# Altium schematic symbol library Diode%.SchLib: 376 symbols (part 9 of 9)
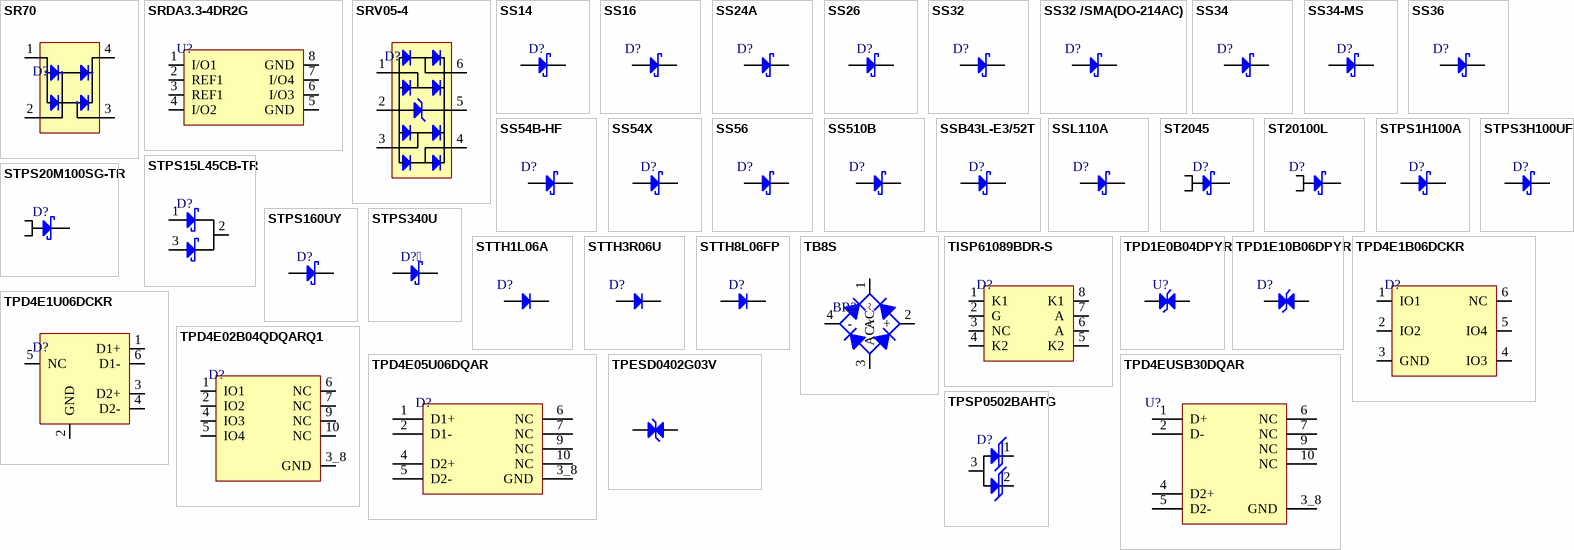
[diagram p17: symbols SR70 to TPSP0502BAHTG]

## STTH1L06A
designator D?
Diode Standard 600V 1A Surface Mount SMA; Manufacturer: STMicroelectronics; Manufacturer Part Number: STTH1L06A; Max Reverse Current: 1uA; Reverse Recovery Time: 80ns; Peak Non-Repetitive Surge Current: 20A; Forward Voltage: 1.3V; Max Forward Surge Current (Ifsm): 10A; Supplier: Mouser; Supplier Part Number: 511-STTH1L06A; RoHS: Yes; Category: Rectifier Diodes; Stock: 400; Pricing: 1=0.44, 10=0.377, 50=0.377, 100=0.283, 1000=0.163, 10000=0.138 (USD); Mounting Technology: Surface Mount; Case/Package: SMA; Pins: 2; Min Operating Temperature: -65°C; Max Operating Temperature: 175°C; Forward Current: 1A; Max Repetitive Reverse Voltage (Vrrm): 600V; Package Quantity: 1; Packaging: Tape and Reel; Max Surge Current: 20A; Recovery Time: 80ns; Average Rectified Current: 1A; Polarity: Standard; Voltage Rating (DC): 600V; Output Current: 1A; Current Rating: 1A; Max Reverse Voltage (DC): 600V; Reverse Voltage: 600V; Series: -; Reverse Recovery Time-Max: 80ns; Length: 4.6mm; Width: 2.95mm; Height: 2.03mm; Radiation Hardening: No; Reach SVHC Compliant: No; Lead Free: Lead Free; RoHS Compliant: Yes; ComponentLink1URL: https://datasheet.ciiva.com/915/cd00002694-915859.pdf?src-supplier=Digi-Key; ComponentLink1Description: https://datasheet.ciiva.com/915/cd00002694-915859.pdf?src-supplier=Digi-Key; ComponentLink2URL: https://datasheet.ciiva.com/915/cd00002694-915858.pdf?src-supplier=Digi-Key; ComponentLink2Description: https://datasheet.ciiva.com/915/cd00002694-915858.pdf?src-supplier=Digi-Key; ComponentLink3URL: https://datasheet.ciiva.com/915/cd00002694-915860.pdf?src-supplier=Digi-Key; ComponentLink3Description: https://datasheet.ciiva.com/915/cd00002694-915860.pdf?src-supplier=Digi-Key; ComponentLink4URL: https://datasheet.ciiva.com/7964/1671053-7964013.pdf?src-supplier=Element14; ComponentLink4Description: https://datasheet.ciiva.com/7964/1671053-7964013.pdf?src-supplier=Element14; ComponentLink5URL: https://datasheet.ciiva.com/7964/1671053-7964014.pdf?src-supplier=Element14; ComponentLink5Description: https://datasheet.ciiva.com/7964/1671053-7964014.pdf?src-supplier=Element14; ComponentLink6URL: https://datasheet.ciiva.com/26818/getdatasheetpartid-65243-26818021.pdf?src-supplier=Verical; ComponentLink6Description: https://datasheet.ciiva.com/26818/getdatasheetpartid-65243-26818021.pdf?src-supplier=Verical; LCSC Part Number: C98801; Item Type: Diode
footprint SMA
pins: 1 K, 2 A

## STTH3R06U
designator D?
DIODE GEN PURP 600V 3A SMB; Manufacturer: STMicroelectronics; Manufacturer Part Number: STTH3R06U; Supplier: Mouser; Supplier Part Number: 511-STTH3R06U; RoHS: Yes; Category: Rectifier Diodes; Stock: 11406; Pricing: 1=0.87, 10=0.782, 50=0.782, 100=0.61, 1000=0.392, 10000=0.339 (USD); ComponentLink1URL: https://datasheet.ciiva.com/4452/cd00005137-58102-4452784.pdf?src-supplier=Mouser; ComponentLink1Description: https://datasheet.ciiva.com/4452/cd00005137-58102-4452784.pdf?src-supplier=Mouser; ComponentLink2URL: https://datasheet.ciiva.com/22735/1671131-22735253.pdf?src-supplier=Element14; ComponentLink2Description: https://datasheet.ciiva.com/22735/1671131-22735253.pdf?src-supplier=Element14; ComponentLink3URL: https://datasheet.ciiva.com/16491/cd00005137-16491959.pdf?src-supplier=Future+Electronics; ComponentLink3Description: https://datasheet.ciiva.com/16491/cd00005137-16491959.pdf?src-supplier=Future+Electronics; ComponentLink4URL: https://datasheet.ciiva.com/916/cd00005137-916206.pdf?src-supplier=Digikey; ComponentLink4Description: https://datasheet.ciiva.com/916/cd00005137-916206.pdf?src-supplier=Digikey; ComponentLink5URL: https://datasheet.ciiva.com/916/cd00005137-916207.pdf?src-supplier=Digikey; ComponentLink5Description: https://datasheet.ciiva.com/916/cd00005137-916207.pdf?src-supplier=Digikey; ComponentLink6URL: https://datasheet.ciiva.com/916/cd00005137-916208.pdf?src-supplier=Digikey; ComponentLink6Description: https://datasheet.ciiva.com/916/cd00005137-916208.pdf?src-supplier=Digikey; LCSC Part Number: C84189; Item Type: Diode
footprint SMB_
pins: 1 A, 2 K

## STTH8L06FP
designator D?
DIODE GEN PURP 600V 8A TO220FPAC; Manufacturer: STMicroelectronics; Manufacturer Part Number: STTH8L06FP; Supplier: Mouser; LCSC Part Number: C77956; RoHS: Yes; Item Type: Diode; Stock: 2675; Pricing: 1=0.8, 10=0.793, 50=0.793, 100=0.793, 1000=0.673, 10000=0.377 (USD); ComponentLink1URL: https://datasheet.ciiva.com/4455/cd00002721-110256-4455363.pdf?src-supplier=Mouser; ComponentLink1Description: https://datasheet.ciiva.com/4455/cd00002721-110256-4455363.pdf?src-supplier=Mouser; ComponentLink2URL: https://datasheet.ciiva.com/7964/1522573-7964086.pdf?src-supplier=Element14; ComponentLink2Description: https://datasheet.ciiva.com/7964/1522573-7964086.pdf?src-supplier=Element14; ComponentLink3URL: https://datasheet.ciiva.com/917/cd00002721-917751.pdf?src-supplier=Digikey; ComponentLink3Description: https://datasheet.ciiva.com/917/cd00002721-917751.pdf?src-supplier=Digikey; ComponentLink4URL: https://datasheet.ciiva.com/14169/cd00002721-14169005.pdf?src-supplier=Distrelec; ComponentLink4Description: https://datasheet.ciiva.com/14169/cd00002721-14169005.pdf?src-supplier=Distrelec
footprint TO-220-2
pins: 1 K, 2 A

## TB8S
designator BR?
30A 950mV@1A 1A 800V TBS Bridge Rectifiers ROHS; Manufacturer: MDD; Manufacturer Part Number: TB8S; Package: TBS; LCSC Part Number: C65030; Item Type: Bridge Rectifier; ComponentLink1Description: LCSC; ComponentLink1URL: https://www.lcsc.com/product-detail/Bridge-Rectifiers_MDD-Microdiode-Electronics-TB8S_C65030.html
footprint TB8S
pins: 1 AC~, 2 +, 3 AC~, 4 -

## TISP61089BDR-S
designator D?
THYRISTOR 170V 30A 8SOIC; Manufacturer: Bourns; Manufacturer Part Number: TISP61089BDR-S; Number of Elements: 2; Value: 100pF; Forward Voltage: 3V; Hold Current: 150mA; Current Rating: -5uA; Item Type: (TVS/ESD); Supplier: Digikey; Supplier Part Number: TISP61089BDR-SCT-ND; RoHS: Yes; Category: TRIACs; Stock: 22616; Pricing: 1=1.38, 10=1.129, 100=0.8781, 500=0.74428, 1000=0.6063 (USD); Mounting Technology: Surface Mount; Case/Package: SOIC; Pins: 8; Weight: 0.004762oz; Min Operating Temperature: -40°C; Max Operating Temperature: 85°C; Packaging: Tape and Reel; Package Quantity: 2500; Max Repetitive Reverse Voltage (Vrrm): 170V; Number of Circuits: 2; Peak Pulse Current: 30A; Operating Supply Voltage: 3V; Series: -; Length: 5mm; Width: 4mm; Height: 1.55mm; Radiation Hardening: No; Reach SVHC Compliant: No; Lead Free: Lead Free; RoHS Compliant: Yes; ComponentLink1URL: https://datasheet.ciiva.com/30076/tisp61089b-30076825.pdf?src-supplier=Onlinecomponents.com; ComponentLink1Description: https://datasheet.ciiva.com/30076/tisp61089b-30076825.pdf?src-supplier=Onlinecomponents.com; ComponentLink2URL: https://datasheet.ciiva.com/46364/2035135-46364842.pdf?src-supplier=Jameco; ComponentLink2Description: https://datasheet.ciiva.com/46364/2035135-46364842.pdf?src-supplier=Jameco; ComponentLink3URL: https://datasheet.ciiva.com/4744/tisp61089b-75813-4744776.pdf?src-supplier=Mouser; ComponentLink3Description: https://datasheet.ciiva.com/4744/tisp61089b-75813-4744776.pdf?src-supplier=Mouser; ComponentLink4URL: https://datasheet.ciiva.com/362/tisp61089b-362311.pdf?src-supplier=Digikey; ComponentLink4Description: https://datasheet.ciiva.com/362/tisp61089b-362311.pdf?src-supplier=Digikey; LCSC Part Number: C415877
footprint SOIC-8(0.154", 3.90mm Width)
pins: 1 K1, 2 G, 3 NC, 4 K2, 5 K2, 6 A, 7 A, 8 K1

## TPD1E0B04DPYR
designator U?
TVS DIODE 3.6VWM 19VC 2X1SON; Manufacturer: Texas Instruments; Manufacturer Part Number: TPD1E0B04DPYR; Interface: USB; Number of Channels: 1; Reverse Standoff Voltage: 3.6V; Min Breakdown Voltage: 6.7V; Peak Pulse Current: 1.7A; Peak Pulse Power: 15W; Power Line Protection: No; Diode Type: ZENER; Direction: 211Direction; Supplier: Digikey; Supplier Part Number: 296-47864-1-ND; RoHS: Yes; Category: Integrated Circuits (ICs); Stock: 16132; Pricing: 1=0.32, 10=0.216, 100=0.095, 500=0.09, 1000=0.08874 (USD); Mounting Technology: Surface Mount; Case/Package: 0402; Pins: 2NUMBER; Case Code (Imperial): 0402; Case Code (Metric): 1006; Min Operating Temperature: -40°C; Max Operating Temperature: 125°C; Packaging: Cut Tape; Number of Bidirectional Channels: 1; Series: -; Breakdown Voltage: 6.7V; Length: 600um; Width: 1mm; Height: 450um; Thickness: 370um; RoHS Compliant: Yes; ComponentLink1URL: http://www.ti.com/lit/ds/symlink/tpd1e0b04.pdf?src-supplier=Digikey; ComponentLink1Description: http://www.ti.com/lit/ds/symlink/tpd1e0b04.pdf?src-supplier=Digikey; ComponentLink2URL: http://www.ti.com/general/docs/suppproductinfo.tsp?distId=10&amp;gotoUrl=http%3A%2F%2Fwww.ti.com%2Flit%2Fgpn%2Ftpd1e0b04&src-supplier=Digikey; ComponentLink2Description: http://www.ti.com/general/docs/suppproductinfo.tsp?distId=10&amp;gotoUrl=http%3A%2F%2Fwww.ti.com%2Flit%2Fgpn%2Ftpd1e0b04&src-supplier=Digikey
footprint 2-X1SON (1x.60)
pins: 1 K, 2 A

## TPD1E10B06DPYR
designator D?
DIODE TVS SMD 5.5V 5A 90W; Manufacturer: Texas Instruments; Manufacturer Part Number: TPD1E10B06DPYR; Capacitance: 12pF; Direction: Bidirectional; Breakdown Voltage: 6V; Number of Channels: 1; Clamping Voltage: 14V; Power Line Protection: No; Leakage Current: 100nA; ESD Protection: Yes; Test Current: 1mA; Element Configuration: Single; Interface: GPIO; Diode Type: ZENER; Supplier 1: Mouser; RoHS: Yes; Category: TVS Diodes; Pricing 1: 1=0.39000, 10=0.29800, 50=0.29800, 100=0.18600, 500=0.12700, 1000=0.09800, 2500=0.08300, 10000=0.07500 (USD); Case/Package: SON; Number of Pins: 2; Contact Plating: Gold; Min Operating Temperature: -40°C; Max Operating Temperature: 125°C; Package Quantity: 1; Packaging: Tape and Reel; Number of Bidirectional Channels: 1; Reverse Standoff Voltage: 5.5V; Min Breakdown Voltage: 6V; Peak Pulse Power: 90W; Working Voltage: 5.5V; Max Reverse Leakage Current: 100nA; Peak Pulse Current: 5A; Resistor Type: Zener; Series: -; Length: 1.1mm; Width: 0.7mm; Height: 0.35mm; Radiation Hardening: No; REACH SVHC: No SVHC; Lead Free: Lead Free; RoHS Compliant: Yes; ComponentLink1URL: https://datasheet.ciiva.com/22691/1877100-22691786.pdf?src-supplier=Element14; ComponentLink1Description: https://datasheet.ciiva.com/22691/1877100-22691786.pdf?src-supplier=Element14; ComponentLink2URL: https://datasheet.ciiva.com/46384/1877100-46384054.pdf?src-supplier=Element14; ComponentLink2Description: https://datasheet.ciiva.com/46384/1877100-46384054.pdf?src-supplier=Element14; ComponentLink3URL: https://datasheet.ciiva.com/2961/tpd1e10b06-2961245.pdf?src-supplier=Digi-Key; ComponentLink3Description: https://datasheet.ciiva.com/2961/tpd1e10b06-2961245.pdf?src-supplier=Digi-Key; ComponentLink4URL: https://datasheet.ciiva.com/6574/tpd1e10b06-6574654.pdf?src-supplier=Digi-Key; ComponentLink4Description: https://datasheet.ciiva.com/6574/tpd1e10b06-6574654.pdf?src-supplier=Digi-Key; ComponentLink5URL: https://datasheet.ciiva.com/2961/tpd1e10b06-2961246.pdf?src-supplier=Digi-Key; ComponentLink5Description: https://datasheet.ciiva.com/2961/tpd1e10b06-2961246.pdf?src-supplier=Digi-Key; ComponentLink6URL: https://datasheet.ciiva.com/14195/tpd1e10b06-14195178.pdf?src-supplier=Avnet; ComponentLink6Description: https://datasheet.ciiva.com/14195/tpd1e10b06-14195178.pdf?src-supplier=Avnet; Supplier Part Number 1: 595-TPD1E10B06DPYR
footprint X1SON (TVS 6A@80/20µs 14V 6V 5.5V@(MAX))
pins: 1 K, 2 A

## TPD4E1B06DCKR
designator D?
TVS DIODE 5.5VWM 14.5VC SC706; Manufacturer: Texas Instruments; Manufacturer Part Number: TPD4E1B06DCKR; Item Type: IC; Supplier: Mouser; LCSC Part Number: C840093; RoHS: Yes; Stock: 26732; Pricing: 1=0.62, 10=0.453, 50=0.453, 100=0.31, 1000=0.236, 10000=0.195 (USD); ComponentLink1URL: https://datasheet.ciiva.com/6574/tpd4e1b06-6574671.pdf?src-supplier=Digikey; ComponentLink1Description: https://datasheet.ciiva.com/6574/tpd4e1b06-6574671.pdf?src-supplier=Digikey; ComponentLink2URL: https://datasheet.ciiva.com/12545/tpd4e1b06-224687-12545147.pdf?src-supplier=Mouser; ComponentLink2Description: https://datasheet.ciiva.com/12545/tpd4e1b06-224687-12545147.pdf?src-supplier=Mouser
footprint SOT-363
pins: 1 IO1, 2 IO2, 3 GND, 4 IO3, 5 IO4, 6 NC

## TPD4E1U06DCKR
designator D?
TVS DIODE 5.5VWM 15VC SC70-6; Manufacturer: Texas Instruments; Manufacturer Part Number: TPD4E1U06DCKR; Direction: Unidirectional; Value: 1pF; Operating Supply Voltage: 5.5V; Min Breakdown Voltage: 6.5V; Clamping Voltage: 11V; Peak Pulse Power: 45W; Power Line Protection: Yes; Number of Channels: 4; Test Current: 1mA; Max Reverse Leakage Current: 10nA; Peak Pulse Current: 3A; Interface: LVDS,USB,Ethernet; Supplier: Mouser; LCSC Part Number: C194628; RoHS: Yes; Item Type: TVS; Stock: 17577; Pricing: 1=0.35, 10=0.268, 50=0.268, 100=0.163, 1000=0.102, 10000=0.081 (USD); Mounting Technology: Surface Mount; Case/Package: SC; Pins: 6; Min Operating Temperature: -40°C; Max Operating Temperature: 125°C; Package Quantity: 3000; Packaging: Tape and Reel; Reverse Standoff Voltage: 5.5V; Breakdown Voltage: 6.5V; Termination: SMD/SMT; ESD Protection: Yes; Working Voltage: 5.5V; Max Power Dissipation: 45W; Series: -; Number of Unidirectional Channels: 4; Length: 2.15mm; Width: 1.4mm; Height: 1mm; Reach SVHC Compliant: No; Lead Free: Lead Free; RoHS Compliant: Yes; ComponentLink1URL: https://datasheet.ciiva.com/12545/tpd4e1u06-224689-12545136.pdf?src-supplier=Mouser; ComponentLink1Description: https://datasheet.ciiva.com/12545/tpd4e1u06-224689-12545136.pdf?src-supplier=Mouser
footprint SOT-363
pins: 1 D1+, 2 GND, 3 D2+, 4 D2-, 5 NC, 6 D1-

## TPD4E02B04QDQARQ1
designator D?
TVS DIODE 3.6VWM 8.8VC 10USON; Manufacturer: Texas Instruments; Manufacturer Part Number: TPD4E02B04QDQARQ1; Interface: LVDS,USB,Ethernet,HDMI; Number of Channels: 4; Reverse Standoff Voltage: 3.6V; Min Breakdown Voltage: 5.5V; Peak Pulse Current: 2A; Peak Pulse Power: 17W; Power Line Protection: No; Diode Type: ZENER; Supplier: Mouser; Supplier Part Number: 595-D4E02B04QDQARQ1; RoHS: Yes; Category: Integrated Circuits (ICs); Stock: 28501; Pricing: 1=0.68, 10=0.579, 50=0.579, 100=0.403, 1000=0.286, 10000=0.227 (USD); Mounting Technology: Surface Mount; Pins: 10; Min Operating Temperature: -40°C; Max Operating Temperature: 125°C; Packaging: Cut Tape; Number of Bidirectional Channels: 4; Series: Automotive, AEC-Q101; RoHS Compliant: Yes; ComponentLink1URL: http://www.ti.com/lit/ds/symlink/tpd4e02b04-q1.pdf?src-supplier=Digikey; ComponentLink1Description: http://www.ti.com/lit/ds/symlink/tpd4e02b04-q1.pdf?src-supplier=Digikey; LCSC Part Number: C1973193; Item Type: Diode
footprint uSON_10
pins: 1 IO1, 2 IO2, 3_8 GND, 4 IO3, 5 IO4, 6 NC, 7 NC, 9 NC, 10 NC

## TPD4E05U06DQAR
designator D?
uSON-10 ESD Protection Devices ROHS; Manufacturer: TECH PUBLIC; Manufacturer Part Number: TPD4E05U06DQAR; Item Type: Diode; ComponentLink1Description: LCSC; ComponentLink1URL: https://lcsc.com/product-detail/ESD-Protection-Devices_TECH-PUBLIC-TPD4E05U06DQAR_C2827646.html; Footprint: uSON-10; LCSC Part Number: C2827646
footprint uSON_10
pins: 1 D1+, 2 D1-, 3_8 GND, 4 D2+, 5 D2-, 6 NC, 7 NC, 9 NC, 10 NC

## TPD4EUSB30DQAR
designator U?
TVS DIODE 5.5V 8V 10USON; Manufacturer: Texas Instruments; Manufacturer Part Number: TPD4EUSB30DQAR; Direction: Unidirectional; Capacitance: 0.8pF; Number of Bidirectional Channels: 4; Peak Pulse Power: 45W; Power Line Protection: Yes; Breakdown Voltage: 7V; Peak Pulse Current: 1A; Interface: USB; Data Rate: 6Gbps; Current Rating: 5A; ComponentLink1URL: http://sg.element14.com/webapp/wcs/stores/servlet/OpenCAD?catalogId=15001&langId=65&id=800000154998&storeId=10191&returnURL=http%3A%2F%2Fsg.element14.com%2Ftexas-instruments%2Ftpd2eusb30adrtr%2Fdiode-esd-dual-usb3-0-sot-3%2Fdp%2F1869645&src-supplier=Element14; ComponentLink1Description: http://sg.element14.com/webapp/wcs/stores/servlet/OpenCAD?catalogId=15001&langId=65&id=800000154998&storeId=10191&returnURL=http%3A%2F%2Fsg.element14.com%2Ftexas-instruments%2Ftpd2eusb30adrtr%2Fdiode-esd-dual-usb3-0-sot-3%2Fdp%2F1869645&src-supplier=Element14; ComponentLink2URL: http://www.ti.com/general/docs/lit/getliterature.tsp?genericPartNumber=TPD2EUSB30A&&fileType=pdf&src-supplier=Element14; ComponentLink2Description: http://www.ti.com/general/docs/lit/getliterature.tsp?genericPartNumber=TPD2EUSB30A&&fileType=pdf&src-supplier=Element14; ComponentLink3URL: http://www.ti.com/lit/ds/symlink/tpd2eusb30a.pdf?src-supplier=Digi-Key; ComponentLink3Description: http://www.ti.com/lit/ds/symlink/tpd2eusb30a.pdf?src-supplier=Digi-Key; ComponentLink4URL: https://www.verical.com/server-webapp/html/getDatasheet?partID=318065&src-supplier=Verical; ComponentLink4Description: https://www.verical.com/server-webapp/html/getDatasheet?partID=318065&src-supplier=Verical; ComponentLink5URL: http://focus.ti.com/lit/ds/symlink/tpd4eusb30.pdf?src-supplier=Avnet+Europe; ComponentLink5Description: http://focus.ti.com/lit/ds/symlink/tpd4eusb30.pdf?src-supplier=Avnet+Europe; Supplier 1: Digi-Key; Stock 1: 1718; Pricing 1: 1=0.83, 10=0.735, 100=0.5632, 500=0.4452, 1000=0.35616 (USD); Number of Pins: 10; Min Operating Temperature: -40°C; Max Operating Temperature: 85°C; Package Quantity: 1; Packaging: Tape and Reel; Reverse Standoff Voltage: 5.5V; Min Breakdown Voltage: 8V; Clamping Voltage: 8V; Number of Channels: 4; Working Voltage: 5.5V; ESD Protection: Yes; Termination: SMD/SMT; Length: 2.5mm; Width: 1.1mm; Height: 0.5mm; Depth: 1mm; Radiation Hardening: No; REACH SVHC: No SVHC; Lead Free: Lead Free; RoHS Compliant: Yes; ComponentLink6URL: http://www.ti.com/general/docs/lit/getliterature.tsp?genericPartNumber=TPD4EUSB30&&fileType=pdf&src-supplier=Farnell; ComponentLink6Description: http://www.ti.com/general/docs/lit/getliterature.tsp?genericPartNumber=TPD4EUSB30&&fileType=pdf&src-supplier=Farnell; ComponentLink7URL: http://www.farnell.com/datasheets/1882087.pdf?src-supplier=Element14; ComponentLink7Description: http://www.farnell.com/datasheets/1882087.pdf?src-supplier=Element14; ComponentLink8URL: http://www.farnell.com/datasheets/2003422.pdf?src-supplier=Element14; ComponentLink8Description: http://www.farnell.com/datasheets/2003422.pdf?src-supplier=Element14; ComponentLink9URL: http://www.ti.com/lit/ds/symlink/tpd4eusb30.pdf?src-supplier=Digi-Key; ComponentLink9Description: http://www.ti.com/lit/ds/symlink/tpd4eusb30.pdf?src-supplier=Digi-Key; ComponentLink10URL: https://www.verical.com/server-webapp/html/getDatasheet?partID=299321&src-supplier=Verical; ComponentLink10Description: https://www.verical.com/server-webapp/html/getDatasheet?partID=299321&src-supplier=Verical; Supplier Part Number 1: 296-28063-1-ND; LCSC Part Number: C90627
footprint uSON_10
pins: 1 D+, 2 D-, 3_8 GND, 4 D2+, 5 D2-, 6 NC, 7 NC, 9 NC, 10 NC

## TPESD0402G03V
designator D?
0402 ESD and Surge Protection (TVS/ESD) ROHS; Manufacturer: TECH PUBLIC; Manufacturer Part Number: TPESD0402G03V; Item Type: ESD Diode; Package: 0402; LCSC Part Number: C558614; ComponentLink1Description: LCSC; ComponentLink1URL: https://www.lcsc.com/product-detail/span-style-background-color-ff0-ESD-span-Protection-Devices_TECH-PUBLIC-TPESD0402G03V_C558614.html
footprint TPESD0402G03V
pins: 1 A, 2 A

## TPSP0502BAHTG
designator D?
SOT-23(TO-236) ESD Protection Devices ROHS; Manufacturer: TECH PUBLIC; Manufacturer Part Number: TPSP0502BAHTG; Package: SOT-23(TO-236); LCSC Part Number: C2827647; Item Type: ESD Protection; ComponentLink1Description: LCSC; ComponentLink1URL: https://www.lcsc.com/product-detail/ESD-Protection-Devices_TECH-PUBLIC-TPSP0502BAHTG_C2827647.html
footprint SOT-23 (TRANS NPN 40V 0.6A SOT23)
pins: 1 K, 2 K, 3 A

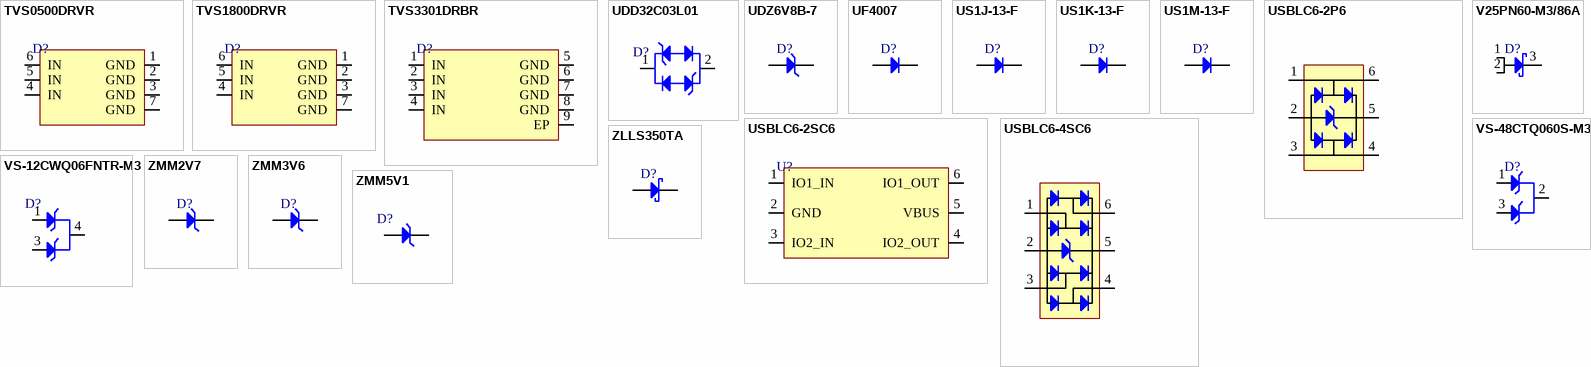
[diagram p9: symbols TVS0500DRVR to ZMM5V1]

## TVS0500DRVR
designator D?
9.5V 400W 7.5V 5V WSON-6(2x2) ESD and Surge Protection (TVS/ESD) ROHS; Manufacturer: Texas Instruments; Manufacturer Part Number: TVS0500DRVR; Item Type: TVS Diodes; Supplier: Digikey; LCSC Part Number: C609571; RoHS: Yes; Stock: 3745; Pricing: 1=0.51, 10=0.373, 100=0.254, 500=0.199, 1000=0.178 (USD); ComponentLink1URL: http://www.ti.com/lit/ds/symlink/tvs0500.pdf?src-supplier=Farnell; ComponentLink1Description: http://www.ti.com/lit/ds/symlink/tvs0500.pdf?src-supplier=Farnell; ComponentLink2URL: http://www.ti.com/lit/ds/symlink/tvs0500.pdf?src-supplier=Digikey; ComponentLink2Description: http://www.ti.com/lit/ds/symlink/tvs0500.pdf?src-supplier=Digikey
footprint WSON-6(2x2)
pins: 1 GND, 2 GND, 3 GND, 4 IN, 5 IN, 6 IN, 7 GND

## TVS1800DRVR
designator D?
1 Surface Mount WSON-6(2x2) Surge Protection Devices (SPDs) ROHS; Manufacturer: Texas Instruments; Manufacturer Part Number: TVS1800DRVR; Item Type: ESD Diode; Supplier: Mouser; LCSC Part Number: C2649846; RoHS: Yes; Stock: 5073; Pricing: 1=0.5, 10=0.388, 50=0.388, 100=0.294, 1000=0.227, 10000=0.185 (USD); Pins: 6NUMBER; Length: 2mm; Width: 2mm; Height: 800um; Thickness: 750um; ComponentLink1URL: http://www.ti.com/general/docs/suppproductinfo.tsp?distId=10&amp;gotoUrl=http%3A%2F%2Fwww.ti.com%2Flit%2Fgpn%2Ftvs1800&src-supplier=Digikey; ComponentLink1Description: http://www.ti.com/general/docs/suppproductinfo.tsp?distId=10&amp;gotoUrl=http%3A%2F%2Fwww.ti.com%2Flit%2Fgpn%2Ftvs1800&src-supplier=Digikey
footprint WSON-6(2x2)
pins: 1 GND, 2 GND, 3 GND, 4 IN, 5 IN, 6 IN, 7 GND

## TVS3301DRBR
designator D?
TVS DEVICE MIXED 42.5V 8SON; Manufacturer: Texas Instruments; Manufacturer Part Number: TVS3301DRBR; Item Type: IC; Supplier: Mouser; LCSC Part Number: C2864392; RoHS: Yes; Stock: 4054; Pricing: 1=0.59, 10=0.505, 50=0.505, 100=0.351, 1000=0.223, 10000=0.157 (USD); ComponentLink1URL: http://www.ti.com/lit/ds/symlink/tvs3301.pdf?src-supplier=Digikey; ComponentLink1Description: http://www.ti.com/lit/ds/symlink/tvs3301.pdf?src-supplier=Digikey
footprint 8-SON (3x3)
pins: 1 IN, 2 IN, 3 IN, 4 IN, 5 GND, 6 GND, 7 GND, 8 GND, 9 EP

## UDD32C03L01
designator D?
15V 19A 3.3V 4V Bidirectional SOD-323 ESD Protection Devices ROHS; Manufacturer: Brightking; Manufacturer Part Number: UDD32C03L01; Item Type: ESD Diode; Footprint: SOD-323; ComponentLink1Description: LCSC; ComponentLink1URL: https://lcsc.com/product-detail/span-style-background-color-ff0-ESD-span-Protection-Devices_Brightking-Elec-TAIWAN-UDD32C03L01_C78439.html; LCSC Part Number: C78439
footprint SOD-323
pins: 1, 2

## UDZ6V8B-7
designator D?
DIODE ZENER 6.79V 200MW SOD323; Manufacturer: Diodes; Manufacturer Part Number: UDZ6V8B-7; Item Type: Zener Diodes; Supplier: Avnet; LCSC Part Number: C444958; RoHS: Yes; Stock: 333000; Pricing: 3000=0.0198, 6000=0.01966, 12000=0.01935, 18000=0.01905, 24000=0.01882 (USD); ComponentLink1URL: http://www.mouser.com/ds/2/115/ds30290-90397.pdf?src-supplier=Mouser; ComponentLink1Description: http://www.mouser.com/ds/2/115/ds30290-90397.pdf?src-supplier=Mouser; ComponentLink2URL: https://www.diodes.com/assets/Datasheets/ds30290.pdf?src-supplier=Digikey; ComponentLink2Description: https://www.diodes.com/assets/Datasheets/ds30290.pdf?src-supplier=Digikey; ComponentLink3URL: http://www.diodes.com///datasheets/ds30290.pdf?src-supplier=Avnet; ComponentLink3Description: http://www.diodes.com///datasheets/ds30290.pdf?src-supplier=Avnet; ComponentLink4URL: https://datasheet.octopart.com/UDZ6V8B-7-Diodes-Inc.-datasheet-110025915.pdf?src-supplier=TME; ComponentLink4Description: https://datasheet.octopart.com/UDZ6V8B-7-Diodes-Inc.-datasheet-110025915.pdf?src-supplier=TME
footprint SOD-323
pins: 1 K, 2 A

## UF4007
designator D?
1.7V@1A 75ns 1A 1kV DO-41 Fast Recovery / High Efficiency Diodes ROHS; Manufacturer: MDD(Microdiode Semiconductor); Manufacturer Part Number: UF4007; Item Type: Diode; Package: DO-41; LCSC Part Number: C960666; ComponentLink1Description: LCSC; ComponentLink1URL: https://www.lcsc.com/product-detail/Fast-Recovery-High-Efficiency-Diodes_MDD-Microdiode-Semiconductor-UF4007_C960666.html
footprint DO-41
pins: 1 A, 2 K

## US1J-13-F
designator D?
DIODE GEN PURP 600V 1A SMA; Manufacturer: Diodes; Manufacturer Part Number: US1J-13-F; Supplier: Future Electronics; LCSC Part Number: C85095; RoHS: Yes; Item Type: Diodes; Stock: 840000; Pricing: 5000=0.0426, 10000=0.0416, 15000=0.041, 25000=0.0402, 50000=0.0387 (USD); ComponentLink1URL: https://datasheet.ciiva.com/8053/ds16008-8053516.pdf?src-supplier=Element14; ComponentLink1Description: https://datasheet.ciiva.com/8053/ds16008-8053516.pdf?src-supplier=Element14; ComponentLink2URL: https://datasheet.ciiva.com/22695/1906610-22695290.pdf?src-supplier=Element14; ComponentLink2Description: https://datasheet.ciiva.com/22695/1906610-22695290.pdf?src-supplier=Element14; ComponentLink3URL: https://datasheet.ciiva.com/8301/ds16008-8301310.pdf?src-supplier=Avnet; ComponentLink3Description: https://datasheet.ciiva.com/8301/ds16008-8301310.pdf?src-supplier=Avnet; ComponentLink4URL: https://datasheet.ciiva.com/913/ds16008-913197.pdf?src-supplier=Digikey; ComponentLink4Description: https://datasheet.ciiva.com/913/ds16008-913197.pdf?src-supplier=Digikey; ComponentLink5URL: https://datasheet.ciiva.com/913/ds16008-913198.pdf?src-supplier=Digikey; ComponentLink5Description: https://datasheet.ciiva.com/913/ds16008-913198.pdf?src-supplier=Digikey; ComponentLink6URL: https://datasheet.ciiva.com/913/ds16008-913199.pdf?src-supplier=Digikey; ComponentLink6Description: https://datasheet.ciiva.com/913/ds16008-913199.pdf?src-supplier=Digikey
footprint SMA
pins: 1 K, 2 A

## US1K-13-F
designator D?
DIODE STANDARD 800V 1A SMA; Manufacturer: Diodes; Manufacturer Part Number: US1K-13-F; Max Reverse Current: 5uA; Reverse Recovery Time: 75ns; Peak Non-Repetitive Surge Current: 30A; Forward Voltage: 1.7V; Supplier: Arrow Electronics; LCSC Part Number: C110532; RoHS: Yes; Item Type: Diodes; Stock: 60000; Pricing: 5000=0.0427, 10000=0.0422 (USD); Mounting Technology: Surface Mount; Case/Package: SMA; Pins: 2; Weight: 0.002258oz; Min Operating Temperature: -65°C; Max Operating Temperature: 150°C; Forward Current: 1A; Max Repetitive Reverse Voltage (Vrrm): 800V; Package Quantity: 5000; Packaging: Tape and Reel; Max Surge Current: 30A; Recovery Time: 75ns; Reverse Voltage (DC): 800V; Average Rectified Current: 1A; Max Forward Surge Current (Ifsm): 30A; Termination: SMD/SMT; Voltage Rating (DC): 800V; Max Reverse Voltage (DC): 800V; Series: -; Reverse Recovery Time-Max: 75ns; Length: 4.6mm; Width: 2.92mm; Height: 2.1mm; Radiation Hardening: No; Reach SVHC Compliant: No; RoHS Compliant: Yes; ComponentLink1URL: https://datasheet.ciiva.com/8053/ds16008-8053517.pdf?src-supplier=Element14; ComponentLink1Description: https://datasheet.ciiva.com/8053/ds16008-8053517.pdf?src-supplier=Element14; ComponentLink2URL: https://datasheet.ciiva.com/22695/1906610-22695291.pdf?src-supplier=Element14; ComponentLink2Description: https://datasheet.ciiva.com/22695/1906610-22695291.pdf?src-supplier=Element14; ComponentLink3URL: https://datasheet.ciiva.com/913/ds16008-913631.pdf?src-supplier=Digikey; ComponentLink3Description: https://datasheet.ciiva.com/913/ds16008-913631.pdf?src-supplier=Digikey
footprint SMA
pins: 1 K, 2 A

## US1M-13-F
designator D?
DIODE STANDARD 1000V 1A SMA; Manufacturer: Diodes; Manufacturer Part Number: US1M-13-F; Value: 10pF; Polarity: 4901Direction; Voltage Rating (DC): 1kV; Supplier: Avnet; LCSC Part Number: C99333; RoHS: Yes; Item Type: Diodes; Stock: 29030000; Pricing: 5000=0.02564, 10000=0.02516, 20000=0.02503, 30000=0.0249, 40000=0.02477 (USD); Current Rating: 1A; Output Current: 1A; Reverse Voltage: 1kV; Lead Free: 5697LeadFree; ComponentLink1URL: https://datasheet.ciiva.com/27052/1542696-27052440.pdf?src-supplier=Jameco; ComponentLink1Description: https://datasheet.ciiva.com/27052/1542696-27052440.pdf?src-supplier=Jameco; ComponentLink2URL: https://datasheet.ciiva.com/4454/ds16008-60440-4454096.pdf?src-supplier=Mouser; ComponentLink2Description: https://datasheet.ciiva.com/4454/ds16008-60440-4454096.pdf?src-supplier=Mouser; ComponentLink3URL: https://datasheet.ciiva.com/8301/ds16008-8301519.pdf?src-supplier=Avnet; ComponentLink3Description: https://datasheet.ciiva.com/8301/ds16008-8301519.pdf?src-supplier=Avnet; ComponentLink4URL: https://datasheet.ciiva.com/8303/ds16008-8303103.pdf?src-supplier=Avnet; ComponentLink4Description: https://datasheet.ciiva.com/8303/ds16008-8303103.pdf?src-supplier=Avnet; ComponentLink5URL: https://datasheet.ciiva.com/917/ds16008-917195.pdf?src-supplier=Digikey; ComponentLink5Description: https://datasheet.ciiva.com/917/ds16008-917195.pdf?src-supplier=Digikey; ComponentLink6URL: https://datasheet.ciiva.com/917/ds16008-917196.pdf?src-supplier=Digikey; ComponentLink6Description: https://datasheet.ciiva.com/917/ds16008-917196.pdf?src-supplier=Digikey; ComponentLink7URL: https://datasheet.ciiva.com/22695/1906610-22695853.pdf?src-supplier=Element14; ComponentLink7Description: https://datasheet.ciiva.com/22695/1906610-22695853.pdf?src-supplier=Element14
footprint SMA(DO-214AC)
pins: 1 K, 2 A

## USBLC6-2P6
designator D?
TVS DIODE 5.25VWM 17VC SOT666; Item Type: ESD Diode; Direction: Unidirectional,Bidirectional; Operating Supply Voltage: 5V; Number of Elements: 1; Value: 3.5pF; Reverse Breakdown Voltage: 6V; Number of Channels: 2; Clamping Voltage: 17V; Power Line Protection: Yes; Test Current: 1mA; Max Reverse Leakage Current: 150nA; Peak Pulse Current: 5A; Max Repetitive Reverse Voltage (Vrrm): 5.25V; LCSC Part Number: C15999; ComponentLink1Description: LCSC; Supplier: Mouser; Supplier Part Number: 511-USBLC6-2P6; RoHS: Yes; Category: TVS Diodes; Stock: 180020; Pricing: 1=0.59, 10=0.514, 50=0.514, 100=0.356, 1000=0.253, 10000=0.197 (USD); Mounting Technology: Surface Mount; Case/Package: SOT-666; Pins: 6; Min Operating Temperature: -40°C; Max Operating Temperature: 125°C; Package Quantity: 1; Packaging: Tape and Reel; Number of Bidirectional Channels: 2; Reverse Standoff Voltage: 5V; Min Breakdown Voltage: 6V; Polarity: Unidirectional,Bidirectional; Breakdown Voltage: 6V; Termination: SMD/SMT; Working Voltage: 5V; ESD Protection: Yes; Leakage Current: 150nA; Max Breakdown Voltage: 6V; Series: USB; Clamping Voltage-Max: 17V; Number of Unidirectional Channels: 2; Length: 1.7mm; Width: 1.3mm; Height: 0.6mm; Depth: 1.3mm; Radiation Hardening: No; Reach SVHC Compliant: No; Lead Free: Lead Free; RoHS Compliant: Yes; ComponentLink2URL: https://datasheet.ciiva.com/14186/usblc6-2-st-eng-tds-14186568.pdf?src-supplier=Distrelec; ComponentLink2Description: https://datasheet.ciiva.com/14186/usblc6-2-st-eng-tds-14186568.pdf?src-supplier=Distrelec; ComponentLink3URL: https://datasheet.ciiva.com/15143/getdatasheetpartid-98673-15143462.pdf?src-supplier=Verical; ComponentLink3Description: https://datasheet.ciiva.com/15143/getdatasheetpartid-98673-15143462.pdf?src-supplier=Verical; ComponentLink4URL: https://datasheet.ciiva.com/22685/1690354-22685832.pdf?src-supplier=Element14; ComponentLink4Description: https://datasheet.ciiva.com/22685/1690354-22685832.pdf?src-supplier=Element14; ComponentLink5URL: https://datasheet.ciiva.com/22692/1690354-22692453.pdf?src-supplier=Element14; ComponentLink5Description: https://datasheet.ciiva.com/22692/1690354-22692453.pdf?src-supplier=Element14; ComponentLink6URL: https://datasheet.ciiva.com/4508/cd00050750-4508892.pdf?src-supplier=Mouser; ComponentLink6Description: https://datasheet.ciiva.com/4508/cd00050750-4508892.pdf?src-supplier=Mouser; ComponentLink7URL: https://datasheet.ciiva.com/16378/cd00050750-16378714.pdf?src-supplier=Future+Electronics; ComponentLink7Description: https://datasheet.ciiva.com/16378/cd00050750-16378714.pdf?src-supplier=Future+Electronics; ComponentLink8URL: https://datasheet.ciiva.com/41444/001184108-da-01-en-ic-esd-protection-usblc6-2p6-sot-666-stm-41444134.pdf?src-supplier=Conrad; ComponentLink8Description: https://datasheet.ciiva.com/41444/001184108-da-01-en-ic-esd-protection-usblc6-2p6-sot-666-stm-41444134.pdf?src-supplier=Conrad
footprint SOT-666
pins: 1 I/O1, 2 GND, 3 I/O2, 4 I/O3, 5 VBUS, 6 I/O4

## USBLC6-2SC6
designator U?
6A 12V 150W 6V Unidirectional 5V SOT-23-6 ESD and Surge Protection (TVS/ESD) ROHS; Manufacturer: TECH PUBLIC; Manufacturer Part Number: USBLC6-2SC6; Package: SOT-23-6; LCSC Part Number: C2827654; Item Type: (TVS/ESD); ComponentLink1Description: LCSC; ComponentLink1URL: https://www.lcsc.com/product-detail/ESD-and-Surge-Protection-TVS-ESD_TECH-PUBLIC-USBLC6-2SC6_C2827654.html
footprint SOT-23-6
pins: 1 IO1_IN, 2 GND, 3 IO2_IN, 4 IO2_OUT, 5 VBUS, 6 IO1_OUT

## USBLC6-4SC6
designator D?
TVS DIODE 5.25VWM 17VC SOT23-6; Item Type: ESD Diode; Value: 4pF; Direction: Unidirectional; Reverse Standoff Voltage: 5V; Min Breakdown Voltage: 6V; Power Line Protection: Yes; Peak Pulse Current: 5A; Number of Elements: 1; Operating Supply Voltage: 860mV; Number of Channels: 4; Clamping Voltage: 17V; Polarity: Unidirectional,Bidirectional; Leakage Current: 150nA; Test Current: 1mA; Max Breakdown Voltage: 10V; Max Reverse Leakage Current: 2uA; LCSC Part Number: C111212; ComponentLink1Description: LCSC; Supplier: Mouser; Supplier Part Number: 511-USBLC6-4SC6; RoHS: Yes; Category: TVS Diodes; Stock: 148069; Pricing: 1=0.58, 10=0.512, 50=0.512, 100=0.381, 1000=0.271, 10000=0.211 (USD); Mounting Technology: Surface Mount; Case/Package: SOT-23; Pins: 6; Min Operating Temperature: -40°C; Max Operating Temperature: 125°C; Packaging: Tape and Reel; Series: USB; Reverse Breakdown Voltage: 6V; Breakdown Voltage: 6V; Termination: SMD/SMT; Working Voltage: 5V; ESD Protection: Yes; Voltage Rating (DC): 5V; Clamping Voltage-Max: 17V; Number of Unidirectional Channels: 4; Length: 3.05mm; Width: 1.75mm; Height: 1.3mm; Depth: 1.75mm; Radiation Hardening: No; Lead Free: Lead Free; RoHS Compliant: Yes; Reach SVHC Compliant: No; ComponentLink2URL: https://datasheet.ciiva.com/14186/usblc6-4-st-eng-tds-14186570.pdf?src-supplier=Distrelec; ComponentLink2Description: https://datasheet.ciiva.com/14186/usblc6-4-st-eng-tds-14186570.pdf?src-supplier=Distrelec; ComponentLink3URL: https://datasheet.ciiva.com/27052/1493951-27052291.pdf?src-supplier=Jameco; ComponentLink3Description: https://datasheet.ciiva.com/27052/1493951-27052291.pdf?src-supplier=Jameco; ComponentLink4URL: https://datasheet.ciiva.com/1220/48344-1220005.pdf?src-supplier=Newark; ComponentLink4Description: https://datasheet.ciiva.com/1220/48344-1220005.pdf?src-supplier=Newark; ComponentLink5URL: https://datasheet.ciiva.com/4507/cd00047494-112581-4507757.pdf?src-supplier=Mouser; ComponentLink5Description: https://datasheet.ciiva.com/4507/cd00047494-112581-4507757.pdf?src-supplier=Mouser; ComponentLink6URL: https://datasheet.ciiva.com/16206/cd00047494-16206119.pdf?src-supplier=Future+Electronics; ComponentLink6Description: https://datasheet.ciiva.com/16206/cd00047494-16206119.pdf?src-supplier=Future+Electronics; ComponentLink7URL: https://datasheet.ciiva.com/15143/getdatasheetpartid-88767-15143364.pdf?src-supplier=Verical; ComponentLink7Description: https://datasheet.ciiva.com/15143/getdatasheetpartid-88767-15143364.pdf?src-supplier=Verical; ComponentLink8URL: https://datasheet.ciiva.com/22685/1498406-22685833.pdf?src-supplier=Element14; ComponentLink8Description: https://datasheet.ciiva.com/22685/1498406-22685833.pdf?src-supplier=Element14; ComponentLink9URL: https://datasheet.ciiva.com/22692/1498406-22692454.pdf?src-supplier=Element14; ComponentLink9Description: https://datasheet.ciiva.com/22692/1498406-22692454.pdf?src-supplier=Element14
footprint SOT-23-6
pins: 1 I/O1, 2 GND, 3 I/O2, 4 I/O3, 5 VBUS, 6 I/O4

## V25PN60-M3/86A
designator D?
DIODE SCHOTTKY 60V 6.4A TO277A; Manufacturer: Vishay Semiconductors; Manufacturer Part Number: V25PN60-M3/86A; Supplier: Mouser; LCSC Part Number: 78-V25PN60-M386A; RoHS: Yes; Item Type: Diode; Stock: 10628; Pricing: 1=1, 10=0.82, 50=0.82, 100=0.638, 1000=0.436, 10000=0.43 (USD); ComponentLink1URL: http://www.farnell.com/datasheets/2614078.pdf?src-supplier=Farnell; ComponentLink1Description: http://www.farnell.com/datasheets/2614078.pdf?src-supplier=Farnell; ComponentLink2URL: http://www.vishay.com/docs/87718/v25pn60.pdf?src-supplier=Digikey; ComponentLink2Description: http://www.vishay.com/docs/87718/v25pn60.pdf?src-supplier=Digikey; ComponentLink3URL: https://www.vishay.com/docs/87718/v25pn60.pdf?src-supplier=Digikey; ComponentLink3Description: https://www.vishay.com/docs/87718/v25pn60.pdf?src-supplier=Digikey
footprint TO-277A
pins: 1 A, 2 A, 3 K

## VS-12CWQ06FNTR-M3
designator D?
Schottky Rectifier, 60 V, 12 A, Dual Common Cathode, TO-252AA; Manufacturer: Vishay Semiconductors; Manufacturer Part Number: VS-12CWQ06FNTR-M3; Forward Voltage: 790mV; Forward Current: 12A; Max Reverse Current: 3mA; Average Rectified Current: 6A; Max Repetitive Reverse Voltage (Vrrm): 60V; Peak Non-Repetitive Surge Current: 320A; Item Type: Rectifier Diode; Supplier 1: Avnet; RoHS: Yes; Category: Rectifier Diodes; Stock 1: 119; Pricing 1: 1=1.14000, 10=1.03000, 25=0.97800, 50=0.92000, 100=0.86500, 250=0.81400, 500=0.77000 (USD); Mount: Surface Mount; Case/Package: TO-252AA; Number of Pins: 3; Min Operating Temperature: -55°C; Max Operating Temperature: 150°C; Packaging: Tape and Reel; Element Configuration: Common Cathode; Max Forward Surge Current (Ifsm): 320A; Max Reverse Voltage (DC): 60V; Series: -; REACH SVHC: No SVHC; RoHS Compliant: Yes; ComponentLink1URL: https://datasheet.ciiva.com/8289/12cwq06f-8289149.pdf?src-supplier=Avnet; ComponentLink1Description: https://datasheet.ciiva.com/8289/12cwq06f-8289149.pdf?src-supplier=Avnet; Supplier Part Number 1: 99Y8339; LCSC Part Number: C467004
footprint TO-252AA
pins: 1 ANODE, 3 ANODE, 4 CATHODE

## VS-48CTQ060S-M3
designator D?
DIODE ARR SCHOTT 60V 20A TO263AB; Manufacturer: Vishay Semiconductors; Manufacturer Part Number: VS-48CTQ060S-M3; Item Type: Rectifier Diodes; Supplier: Mouser; Supplier Part Number: 78-VS-48CTQ060S-M3; RoHS: Yes; Stock: 5641; Pricing: 1=2.03, 10=1.62, 50=1.62, 100=1.35, 1000=0.906, 10000=0.869 (USD); Mounting Technology: Surface Mount; Case/Package: TO-263-3; Packaging: Rail/Tube; Average Rectified Current: 20A; Max Reverse Voltage (DC): 60V; Series: -; RoHS Compliant: Yes; ComponentLink1URL: http://www.vishay.com/docs/94944/vs-48ctq060s-m3.pdf?src-supplier=Digikey; ComponentLink1Description: http://www.vishay.com/docs/94944/vs-48ctq060s-m3.pdf?src-supplier=Digikey
footprint VS-48CTQ060S-M3
pins: 1 ANODE, 2 CATHODE, 3 ANODE

## ZLLS350TA
designator D?
DIODE SCHOTTKY 40V 380MA SOD523; Manufacturer: Diodes Zetex; Manufacturer Part Number: ZLLS350TA; Forward Current: 650mA; Peak Non-Repetitive Surge Current: 6A; Forward Voltage: 1V; Max Power Dissipation: 357mW; Max Reverse Current: 4uA; Reverse Recovery Time: 1ns; Polarity: Standard; Value: 3.5pF; Diode Type: RECTIFIER; Supplier: Future Electronics; Supplier Part Number: 8115933; RoHS: Yes; Category: Schottky Diodes; Stock: 78000; Pricing: 3000=0.102, 9000=0.0979, 12000=0.0969, 30000=0.0937, 45000=0.0906 (USD); Mounting Technology: Surface Mount; Pins: 2; Weight: 3.5E-05oz; Min Operating Temperature: -55°C; Max Operating Temperature: 150°C; Max Repetitive Reverse Voltage (Vrrm): 40V; Packaging: Tape and Reel; Package Quantity: 3000; Max Forward Surge Current (Ifsm): 6A; Average Rectified Current: 380mA; Power Dissipation: 357mW; Termination: SMD/SMT; Voltage Rating (DC): 40V; Power Rating: 357mW; Current Rating: 380mA; Output Current: 380mA; Max Reverse Voltage (DC): 40V; Series: -; Length: 1.3mm; Width: 0.9mm; Height: 0.8mm; Radiation Hardening: No; Lead Free: Lead Free; RoHS Compliant: Yes; ComponentLink1URL: https://datasheet.ciiva.com/4715/zlls350-4715700.pdf?src-supplier=Mouser; ComponentLink1Description: https://datasheet.ciiva.com/4715/zlls350-4715700.pdf?src-supplier=Mouser; ComponentLink2URL: https://datasheet.ciiva.com/4715/zlls350-4715700.pdf?src-supplier=Avnet; ComponentLink2Description: https://datasheet.ciiva.com/4715/zlls350-4715700.pdf?src-supplier=Avnet; ComponentLink3URL: https://datasheet.ciiva.com/914/zlls350-914217.pdf?src-supplier=Digi-Key; ComponentLink3Description: https://datasheet.ciiva.com/914/zlls350-914217.pdf?src-supplier=Digi-Key; ComponentLink4URL: https://datasheet.ciiva.com/914/zlls350-914218.pdf?src-supplier=Digi-Key; ComponentLink4Description: https://datasheet.ciiva.com/914/zlls350-914218.pdf?src-supplier=Digi-Key; ComponentLink5URL: https://datasheet.ciiva.com/914/zlls350-914216.pdf?src-supplier=Digi-Key; ComponentLink5Description: https://datasheet.ciiva.com/914/zlls350-914216.pdf?src-supplier=Digi-Key; LCSC Part Number: C139441; Item Type: Diode
footprint SOD-523 (SOD-523 Schottky Barrier Diodes (SBD) ROHS)
pins: 1 A, 2 K

## ZMM2V7
designator D?
Independent Type 2.5V~2.9V 500mW 2.7V LL-34 Zener Diodes ROHS; Manufacturer: HXY MOSFET; Manufacturer Part Number: ZMM2V7; Item Type: Diode; Package: LL-34; LCSC Part Number: C2891738; ComponentLink1Description: LCSC; ComponentLink1URL: https://www.lcsc.com/product-detail/Zener-Diodes_YONGYUTAI-ZMM2V7_C2891738.html
footprint LL-34
pins: 1 K, 2 A

## ZMM3V6
designator D?
Independent Type 500mW 3.4V~3.8V 3.6V LL-34 Zener Diodes ROHS; Manufacturer: HXY MOSFET; Manufacturer Part Number: ZMM3V6; Item Type: Diode; Package: LL-34; LCSC Part Number: C5345988; ComponentLink1Description: LCSC; ComponentLink1URL: https://www.lcsc.com/product-detail/Zener-Diodes_HXY-MOSFET-ZMM3V6_C5345988.html
footprint LL-34
pins: 1 K, 2 A

## ZMM5V1
designator D?
Independent 4.8V~5.4V 500mW 5.1V LL-34 Single Zener Diodes RoHS; Manufacturer: HXY MOSFET; Manufacturer Part Number: ZMM5V1; Item Type: Diode; Package: LL-34; LCSC Part Number: C5345992; ComponentLink1Description: LCSC; ComponentLink1URL: https://www.lcsc.com/product-detail/C5345992.html?s_z=n_ZMM5V1
footprint LL-34
pins: 1 K, 2 A